# Altium footprint library RJE091884111A.PcbLib: 1 footprints
Each footprint in its own frame and in the unit in brackets; x right, y up, seen from the top. Pads: shape width x height; smd on the part's side, far side on the other; paste and mask are expansions set on the pad; w line width, h text height; cw(c..) or ccw(c..) is an arc to the next point about the centre after c.
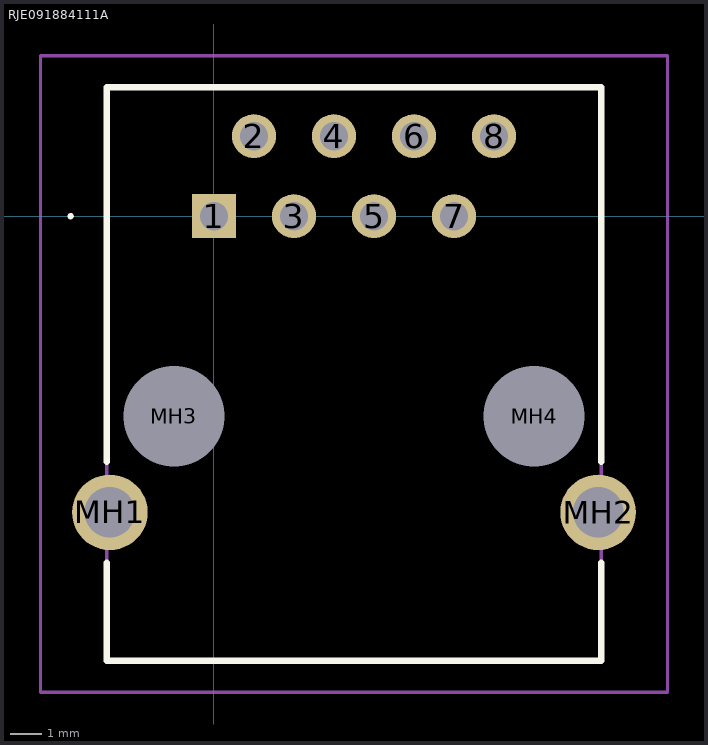
[diagram p0: the footprint, top view; thin cyan lines are the x and y axes]

## RJE091884111A [mm]
pads (12):
  rect 1.4x1.4 hole 0.9: 1(0,0)
  round 1.4 hole 0.9: 2(1.27,2.54) 3(2.54,0) 4(3.81,2.54) 5(5.08,0) 6(6.35,2.54) 7(7.62,0) 8(8.89,2.54)
  round 2.4 hole 1.6: MH1(-3.305,-9.4) MH2(12.195,-9.4)
  round 1.6 hole 3.2 unplated: MH3(-1.27,-6.35) MH4(10.16,-6.35)
Top Overlay:
  lines w0.1: -4.6,0 cw(c-4.55,0) -4.5,0 ; -4.6,0 -4.6,0 ; -4.6,0 ccw(c-4.55,0) -4.5,0 ; -4.5,0 -4.5,0
  lines w0.2: -3.405,-11 -3.405,-14.11 12.295,-14.11 12.295,-11 ; -3.4,-7.8 -3.405,4.09 12.295,4.09 12.295,-7.8
Mechanical 15:
  lines w0.1: -3.405,-14.11 12.295,-14.11 12.295,4.09 -3.405,4.09 -3.405,-14.11
Mechanical 20:
  lines w0.1: -5.505,-15.11 14.395,-15.11 14.395,5.09 -5.505,5.09 -5.505,-15.11